# Altium schematic symbol library MotorDriver_Schlib.SchLib: 78 symbols (part 4 of 4)
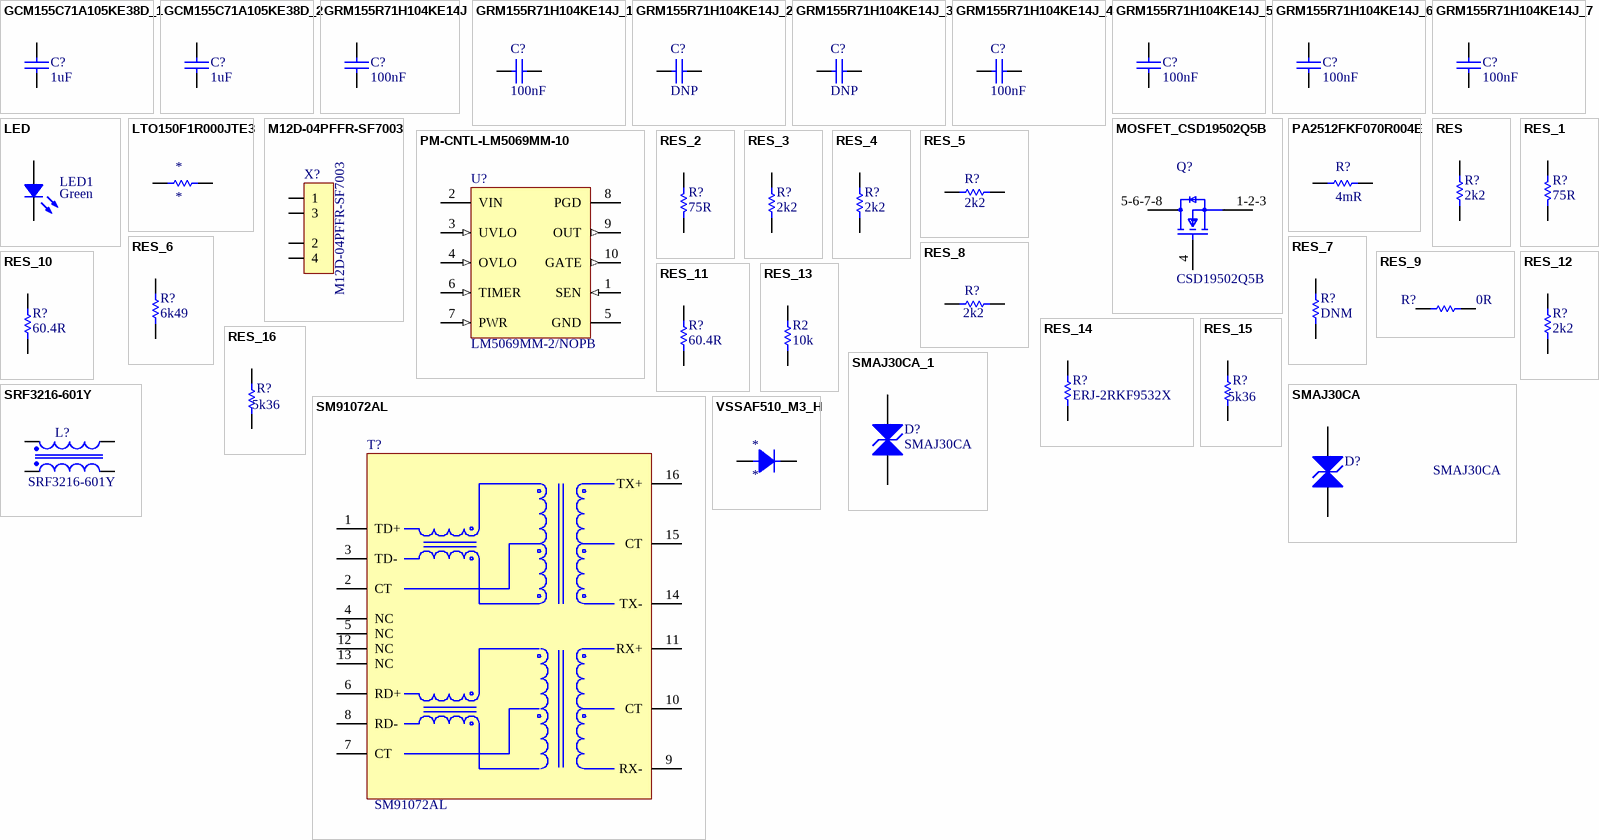
[diagram p4: symbols GCM155C71A105KE38D_1 to VSSAF510_M3_H]

## SMAJ30CA
designator D?
LITTELFUSE - SMAJ30CA - TVS DIODE, 400W, 30V, DO-214AC; Manufacturer: Littelfuse Inc.; Clamping Voltage: 48.4V; Polarity: Bidirectional; Peak Pulse Current: 8.3A; Test Current: 1mA; Reverse Breakdown Voltage: 33.3V; Number of Elements: 1; Leakage Current: 1uA; Element Configuration: Single; Power Line Protection: No; Max Power Dissipation: 3.3W; Max Breakdown Voltage: 36.8V; Manufacturer Part Number: SMAJ30CA; Value: *; Supplier 1: Digi-Key; Stock 1: 28360; Pricing 1: 1=0.45000, 10=0.33900, 25=0.30520, 100=0.16100, 250=0.15928, 500=0.14264, 1000=0.11100, 2500=0.10156 (USD); RoHS: Yes; Mount: Surface Mount; Number of Pins: 2; Min Operating Temperature: -65°C; Max Operating Temperature: 150°C; Peak Pulse Power: 400W; Packaging: Tape and Reel; Reverse Standoff Voltage: 30V; Breakdown Voltage: 33.3V; Package Quantity: 5000; Max Surge Current: 8.3A; Operating Supply Voltage: 30V; Min Breakdown Voltage: 33.3V; Number of Channels: 1; Direction: Bidirectional; Termination: SMD/SMT; Max Reverse Leakage Current: 1uA; Number of Bidirectional Channels: 1; Composition: Zener; Power Dissipation: 400W; Voltage Rating (DC): 30V; Length: 4.5mm; Height: 2.087mm; Width: 2.79mm; Radiation Hardening: No; Lead Free: Lead Free; REACH SVHC: No SVHC; ComponentLink1URL: https://datasheet.ciiva.com/25624/0900766b810f4edb-25624835.pdf?src-supplier=RSComponents; ComponentLink1Description: https://datasheet.ciiva.com/25624/0900766b810f4edb-25624835.pdf?src-supplier=RSComponents; ComponentLink2URL: https://datasheet.ciiva.com/331/littelfuse-tvs-diode-smaj-datasheet-pdf-331093.pdf?src-supplier=Digi-Key; ComponentLink2Description: https://datasheet.ciiva.com/331/littelfuse-tvs-diode-smaj-datasheet-pdf-331093.pdf?src-supplier=Digi-Key; ComponentLink3URL: https://datasheet.ciiva.com/28473/607617-28473413.pdf?src-supplier=Element14; ComponentLink3Description: https://datasheet.ciiva.com/28473/607617-28473413.pdf?src-supplier=Element14; ComponentLink4URL: https://datasheet.ciiva.com/331/littelfuse-tvs-diode-smaj-datasheet-pdf-331094.pdf?src-supplier=Digi-Key; ComponentLink4Description: https://datasheet.ciiva.com/331/littelfuse-tvs-diode-smaj-datasheet-pdf-331094.pdf?src-supplier=Digi-Key; ComponentLink5URL: https://datasheet.ciiva.com/331/littelfuse-tvs-diode-smaj-datasheet-pdf-331095.pdf?src-supplier=Digi-Key; ComponentLink5Description: https://datasheet.ciiva.com/331/littelfuse-tvs-diode-smaj-datasheet-pdf-331095.pdf?src-supplier=Digi-Key; ComponentLink6URL: https://datasheet.ciiva.com/14162/smaj-eng-ds-14162037.pdf?src-supplier=Distrelec; ComponentLink6Description: https://datasheet.ciiva.com/14162/smaj-eng-ds-14162037.pdf?src-supplier=Distrelec; ComponentLink7URL: https://datasheet.ciiva.com/16487/littelfuse-tvs-diode-smaj-16487781.pdf?src-supplier=Future+Electronics; ComponentLink7Description: https://datasheet.ciiva.com/16487/littelfuse-tvs-diode-smaj-16487781.pdf?src-supplier=Future+Electronics; ComponentLink8URL: https://datasheet.ciiva.com/8062/littelfuse-tvs-diode-smaj-8062300.pdf?src-supplier=Element14; ComponentLink8Description: https://datasheet.ciiva.com/8062/littelfuse-tvs-diode-smaj-8062300.pdf?src-supplier=Element14; Supplier Part Number 1: SMAJ30CALFCT-ND
footprint DO-214AC-M (DO-214AC-Medium density)
footprint DO-214AC-H (SMC214 - high density)
pins: 1, 2

## SMAJ30CA_1
designator D?, comment SMAJ30CA
LITTELFUSE - SMAJ30CA - TVS DIODE, 400W, 30V, DO-214AC; Manufacturer: Littelfuse Inc.; Clamping Voltage: 48.4V; Polarity: Bidirectional; Peak Pulse Current: 8.3A; Test Current: 1mA; Reverse Breakdown Voltage: 33.3V; Number of Elements: 1; Leakage Current: 1uA; Element Configuration: Single; Power Line Protection: No; Max Power Dissipation: 3.3W; Max Breakdown Voltage: 36.8V; Manufacturer Part Number: SMAJ30CA; Value: *; Supplier 1: Digi-Key; Stock 1: 28360; Pricing 1: 1=0.45000, 10=0.33900, 25=0.30520, 100=0.16100, 250=0.15928, 500=0.14264, 1000=0.11100, 2500=0.10156 (USD); RoHS: Yes; Mount: Surface Mount; Number of Pins: 2; Min Operating Temperature: -65°C; Max Operating Temperature: 150°C; Peak Pulse Power: 400W; Packaging: Tape and Reel; Reverse Standoff Voltage: 30V; Breakdown Voltage: 33.3V; Package Quantity: 5000; Max Surge Current: 8.3A; Operating Supply Voltage: 30V; Min Breakdown Voltage: 33.3V; Number of Channels: 1; Direction: Bidirectional; Termination: SMD/SMT; Max Reverse Leakage Current: 1uA; Number of Bidirectional Channels: 1; Composition: Zener; Power Dissipation: 400W; Voltage Rating (DC): 30V; Length: 4.5mm; Height: 2.087mm; Width: 2.79mm; Radiation Hardening: No; Lead Free: Lead Free; REACH SVHC: No SVHC; ComponentLink1URL: https://datasheet.ciiva.com/25624/0900766b810f4edb-25624835.pdf?src-supplier=RSComponents; ComponentLink1Description: https://datasheet.ciiva.com/25624/0900766b810f4edb-25624835.pdf?src-supplier=RSComponents; ComponentLink2URL: https://datasheet.ciiva.com/331/littelfuse-tvs-diode-smaj-datasheet-pdf-331093.pdf?src-supplier=Digi-Key; ComponentLink2Description: https://datasheet.ciiva.com/331/littelfuse-tvs-diode-smaj-datasheet-pdf-331093.pdf?src-supplier=Digi-Key; ComponentLink3URL: https://datasheet.ciiva.com/28473/607617-28473413.pdf?src-supplier=Element14; ComponentLink3Description: https://datasheet.ciiva.com/28473/607617-28473413.pdf?src-supplier=Element14; ComponentLink4URL: https://datasheet.ciiva.com/331/littelfuse-tvs-diode-smaj-datasheet-pdf-331094.pdf?src-supplier=Digi-Key; ComponentLink4Description: https://datasheet.ciiva.com/331/littelfuse-tvs-diode-smaj-datasheet-pdf-331094.pdf?src-supplier=Digi-Key; ComponentLink5URL: https://datasheet.ciiva.com/331/littelfuse-tvs-diode-smaj-datasheet-pdf-331095.pdf?src-supplier=Digi-Key; ComponentLink5Description: https://datasheet.ciiva.com/331/littelfuse-tvs-diode-smaj-datasheet-pdf-331095.pdf?src-supplier=Digi-Key; ComponentLink6URL: https://datasheet.ciiva.com/14162/smaj-eng-ds-14162037.pdf?src-supplier=Distrelec; ComponentLink6Description: https://datasheet.ciiva.com/14162/smaj-eng-ds-14162037.pdf?src-supplier=Distrelec; ComponentLink7URL: https://datasheet.ciiva.com/16487/littelfuse-tvs-diode-smaj-16487781.pdf?src-supplier=Future+Electronics; ComponentLink7Description: https://datasheet.ciiva.com/16487/littelfuse-tvs-diode-smaj-16487781.pdf?src-supplier=Future+Electronics; ComponentLink8URL: https://datasheet.ciiva.com/8062/littelfuse-tvs-diode-smaj-8062300.pdf?src-supplier=Element14; ComponentLink8Description: https://datasheet.ciiva.com/8062/littelfuse-tvs-diode-smaj-8062300.pdf?src-supplier=Element14; Supplier Part Number 1: SMAJ30CALFCT-ND
footprint DO-214AC-M (DO-214AC-Medium density)
footprint DO-214AC-H (SMC214 - high density)
pins: 1, 2

## SRF3216-601Y
designator L?
BOURNS - SRF3216A-601Y - FILTER, COMMON MODE, 600R, 0.3A, SMD; Number of Lines: 2; Max Current Rating: 300mA; DC Resistance (DCR): 800mR; Voltage Rating (DC): 50V; Manufacturer: Bourns; Manufacturer Part Number: SRF3216-601Y; Supplier 1: Digi-Key; Stock 1: 1132; Pricing 1: 1=0.78, 10=0.684, 100=0.4888, 500=0.41056, 1000=0.33235 (USD); Mount: Surface Mount; Min Operating Temperature: -40°C; Max Operating Temperature: 125°C; Resistance: 600R; Package Quantity: 2000; Packaging: Tape and Reel; Impedance: 600R; Current Rating: 300mA; Length: 0.126inch; Height: 0.087inch; Width: 0.063inch; REACH SVHC: No SVHC; ComponentLink1URL: http://www.farnell.com/datasheets/2360565.pdf?src-supplier=Farnell; ComponentLink1Description: http://www.farnell.com/datasheets/2360565.pdf?src-supplier=Farnell; ComponentLink2URL: https://media.digikey.com/pdf/Data%20Sheets/Bourns%20PDFs/SRF3216A_Series_DS.pdf?src-supplier=Digi-Key; ComponentLink2Description: https://media.digikey.com/pdf/Data%20Sheets/Bourns%20PDFs/SRF3216A_Series_DS.pdf?src-supplier=Digi-Key; ComponentLink3URL: http://www.farnell.com/datasheets/1955469.pdf?src-supplier=Element14; ComponentLink3Description: http://www.farnell.com/datasheets/1955469.pdf?src-supplier=Element14; Supplier Part Number 1: SRF3216A-601YDKR-ND; Min Operating Temperature: -55°C
footprint SRF3216A (Common Mode Chip Inductors)
pins: 1, 2, 3, 4

## VSSAF510_M3_H
designator *
Supplier 1: Digikey; Supplier Part Number 1: VSSAF510-M3/HGICT-ND
footprint CR_SLIMSMA_DO-221AC_VIS-L
pins: 1 CATHODE, 2 ANODE